# Altium integrated library OmniCore_SDR.IntLib: 98 symbols (part 1 of 2)
Pins are listed as number, name and electrical type; pins without a type are passive.

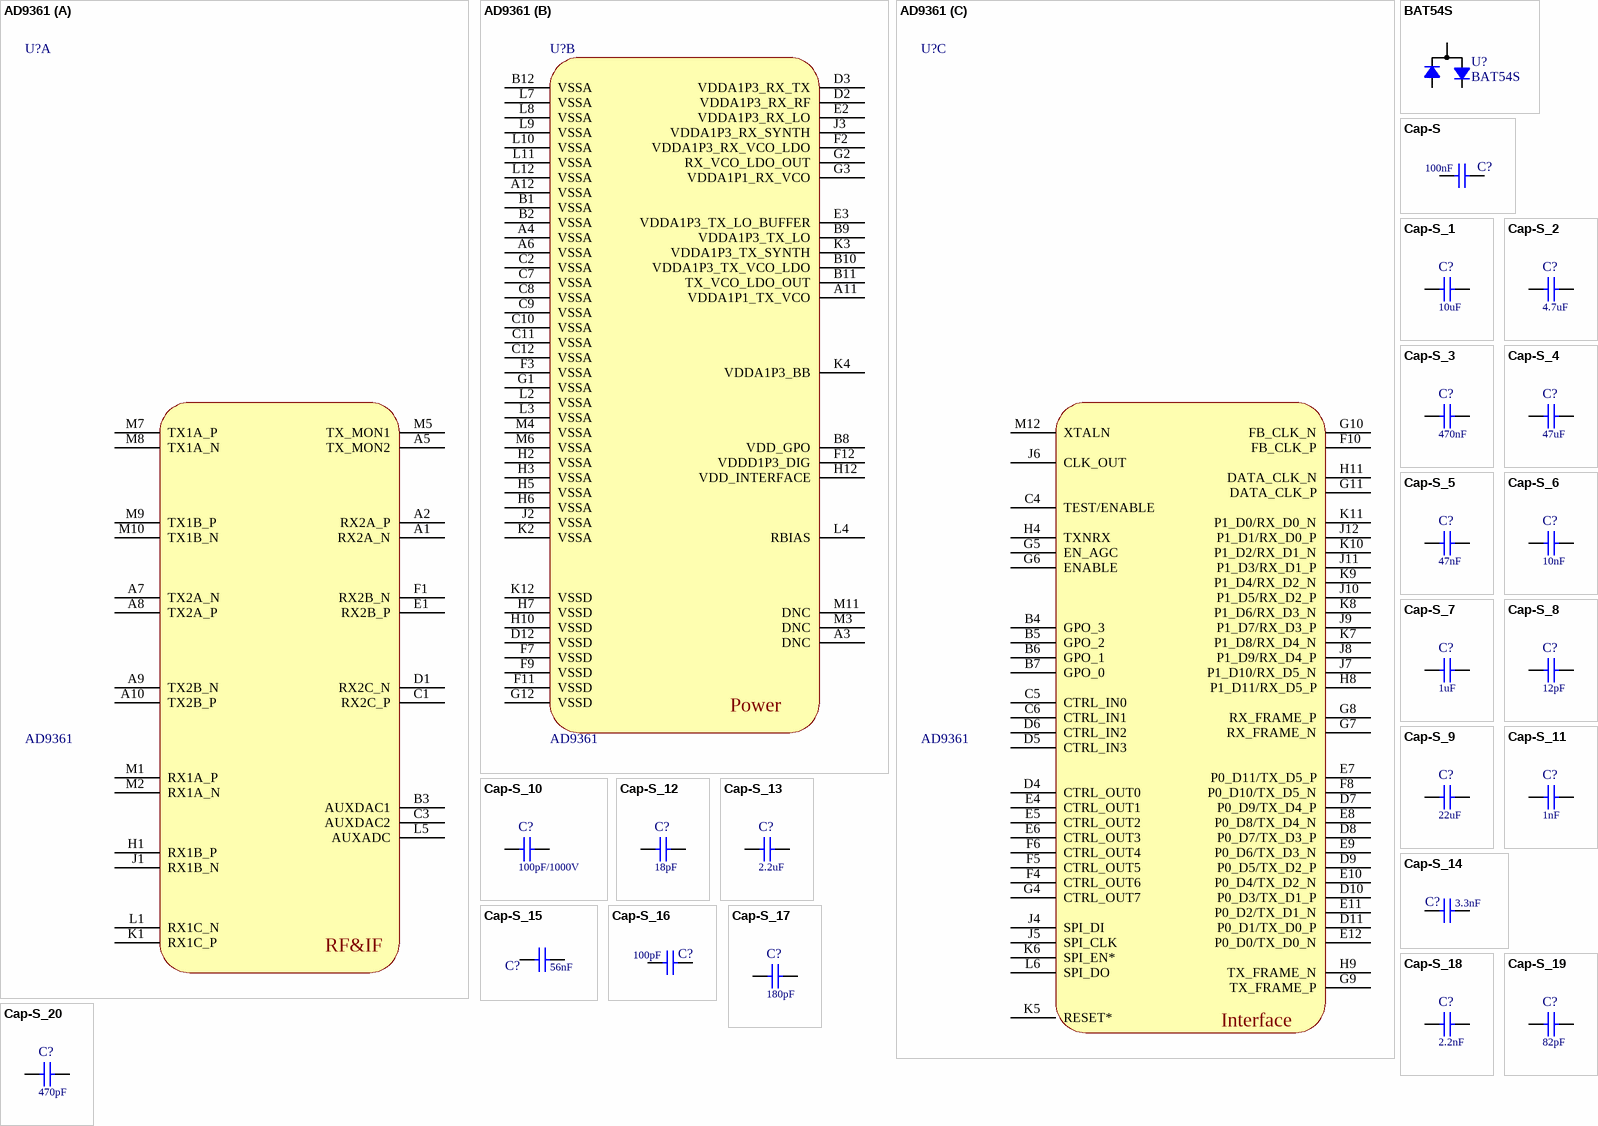
[diagram p0: symbols AD9361 to Cap-S_20]

## AD9361
designator U?
70M-6G射频收发器
footprint BGA144C80P12X12_1000X1000X170
part A pins: A1 RX2A_N, A2 RX2A_P, A5 TX_MON2, A7 TX2A_N, A8 TX2A_P, A9 TX2B_N, A10 TX2B_P, B3 AUXDAC1, C1 RX2C_P, C3 AUXDAC2, D1 RX2C_N, E1 RX2B_P, F1 RX2B_N, H1 RX1B_P, J1 RX1B_N, K1 RX1C_P, L1 RX1C_N, L5 AUXADC, M1 RX1A_P, M2 RX1A_N, M5 TX_MON1, M7 TX1A_P, M8 TX1A_N, M9 TX1B_P, M10 TX1B_N
part B pins: A3 DNC, A4 VSSA, A6 VSSA, A11 VDDA1P1_TX_VCO, A12 VSSA, B1 VSSA, B2 VSSA, B8 VDD_GPO, B9 VDDA1P3_TX_LO, B10 VDDA1P3_TX_VCO_LDO, B11 TX_VCO_LDO_OUT, B12 VSSA, C2 VSSA, C7 VSSA, C8 VSSA, C9 VSSA, C10 VSSA, C11 VSSA, C12 VSSA, D2 VDDA1P3_RX_RF, D3 VDDA1P3_RX_TX, D12 VSSD, E2 VDDA1P3_RX_LO, E3 VDDA1P3_TX_LO_BUFFER, F2 VDDA1P3_RX_VCO_LDO, F3 VSSA, F7 VSSD, F9 VSSD, F11 VSSD, F12 VDDD1P3_DIG, G1 VSSA, G2 RX_VCO_LDO_OUT, G3 VDDA1P1_RX_VCO, G12 VSSD, H2 VSSA, H3 VSSA, H5 VSSA, H6 VSSA, H7 VSSD, H10 VSSD, H12 VDD_INTERFACE, J2 VSSA, J3 VDDA1P3_RX_SYNTH, K2 VSSA, K3 VDDA1P3_TX_SYNTH, K4 VDDA1P3_BB, K12 VSSD, L2 VSSA, L3 VSSA, L4 RBIAS, L7 VSSA, L8 VSSA, L9 VSSA, L10 VSSA, L11 VSSA, L12 VSSA, M3 DNC, M4 VSSA, M6 VSSA, M11 DNC
part C pins: B4 GPO_3, B5 GPO_2, B6 GPO_1, B7 GPO_0, C4 TEST/ENABLE, C5 CTRL_IN0, C6 CTRL_IN1, D4 CTRL_OUT0, D5 CTRL_IN3, D6 CTRL_IN2, D7 P0_D9/TX_D4_P, D8 P0_D7/TX_D3_P, D9 P0_D5/TX_D2_P, D10 P0_D3/TX_D1_P, D11 P0_D1/TX_D0_P, E4 CTRL_OUT1, E5 CTRL_OUT2, E6 CTRL_OUT3, E7 P0_D11/TX_D5_P, E8 P0_D8/TX_D4_N, E9 P0_D6/TX_D3_N, E10 P0_D4/TX_D2_N, E11 P0_D2/TX_D1_N, E12 P0_D0/TX_D0_N, F4 CTRL_OUT6, F5 CTRL_OUT5, F6 CTRL_OUT4, F8 P0_D10/TX_D5_N, F10 FB_CLK_P, G4 CTRL_OUT7, G5 EN_AGC, G6 ENABLE, G7 RX_FRAME_N, G8 RX_FRAME_P, G9 TX_FRAME_P, G10 FB_CLK_N, G11 DATA_CLK_P, H4 TXNRX, H8 P1_D11/RX_D5_P, H9 TX_FRAME_N, H11 DATA_CLK_N, J4 SPI_DI, J5 SPI_CLK, J6 CLK_OUT, J7 P1_D10/RX_D5_N, J8 P1_D9/RX_D4_P, J9 P1_D7/RX_D3_P, J10 P1_D5/RX_D2_P, J11 P1_D3/RX_D1_P, J12 P1_D1/RX_D0_P, K5 RESET*, K6 SPI_EN*, K7 P1_D8/RX_D4_N, K8 P1_D6/RX_D3_N, K9 P1_D4/RX_D2_N, K10 P1_D2/RX_D1_N, K11 P1_D0/RX_D0_N, L6 SPI_DO, M12 XTALN
part A text: RF&IF
part B text: Power
part C text: Interface

## BAT54S
designator U?
footprint SOT-23-3
pins: 1, 2, 3

## Cap-S
designator C?  value 100nF  (hidden comment: Cap-S)
贴片瓷片电容
footprint C0603-L (贴片电容0603 高密度)
footprint C0402-M (Chip Capacitor 0402(1005)  低密度)
footprint C0402-L (Chip Capacitor, Body 1.0x0.5mm, 高密度)
footprint C0603-M (Capacitor SMD 0603 (1608)  低密度)
footprint C0805-L (贴片电容0805-高密度)
footprint C0805-M (贴片电容0805-低密度)
footprint C1206-L (Capacitor 1206 (3216) for Startronics  高密度)
footprint C1206-M (贴片电容1206  低密度)
footprint C1210-L (1210 Capacitor SMD - Startronics  高密度)
footprint C1210-M (贴片电容1210  低密度)
footprint C1812 (贴片电容)
footprint C2010 (贴片电容)
footprint C2512 (贴片电容)
pins: 1, 2

## Cap-S_1
designator C?, comment value 10uF  (hidden comment: Cap-S)
贴片瓷片电容
footprint C0603-L (贴片电容0603 高密度)
footprint C0402-M (Chip Capacitor 0402(1005)  低密度)
footprint C0402-L (Chip Capacitor, Body 1.0x0.5mm, 高密度)
footprint C0603-M (Capacitor SMD 0603 (1608)  低密度)
footprint C0805-L (贴片电容0805-高密度)
footprint C0805-M (贴片电容0805-低密度)
footprint C1206-L (Capacitor 1206 (3216) for Startronics  高密度)
footprint C1206-M (贴片电容1206  低密度)
footprint C1210-L (1210 Capacitor SMD - Startronics  高密度)
footprint C1210-M (贴片电容1210  低密度)
footprint C1812 (贴片电容)
footprint C2010 (贴片电容)
footprint C2512 (贴片电容)
footprint C0402-S (C0402)
pins: 1, 2

## Cap-S_2
designator C?, comment value 4.7uF  (hidden comment: Cap-S)
贴片瓷片电容
footprint C0603-L (贴片电容0603 高密度)
footprint C0402-M (Chip Capacitor 0402(1005)  低密度)
footprint C0402-L (Chip Capacitor, Body 1.0x0.5mm, 高密度)
footprint C0603-M (Capacitor SMD 0603 (1608)  低密度)
footprint C0805-L (贴片电容0805-高密度)
footprint C0805-M (贴片电容0805-低密度)
footprint C1206-L (Capacitor 1206 (3216) for Startronics  高密度)
footprint C1206-M (贴片电容1206  低密度)
footprint C1210-L (1210 Capacitor SMD - Startronics  高密度)
footprint C1210-M (贴片电容1210  低密度)
footprint C1812 (贴片电容)
footprint C2010 (贴片电容)
footprint C2512 (贴片电容)
footprint C0402-S (C0402)
pins: 1, 2

## Cap-S_3
designator C?, comment value 470nF  (hidden comment: Cap-S)
贴片瓷片电容
footprint C0603-L (贴片电容0603 高密度)
footprint C0402-M (Chip Capacitor 0402(1005)  低密度)
footprint C0402-L (Chip Capacitor, Body 1.0x0.5mm, 高密度)
footprint C0603-M (Capacitor SMD 0603 (1608)  低密度)
footprint C0805-L (贴片电容0805-高密度)
footprint C0805-M (贴片电容0805-低密度)
footprint C1206-L (Capacitor 1206 (3216) for Startronics  高密度)
footprint C1206-M (贴片电容1206  低密度)
footprint C1210-L (1210 Capacitor SMD - Startronics  高密度)
footprint C1210-M (贴片电容1210  低密度)
footprint C1812 (贴片电容)
footprint C2010 (贴片电容)
footprint C2512 (贴片电容)
footprint C0402-S (C0402)
pins: 1, 2

## Cap-S_4
designator C?, comment value 47uF  (hidden comment: Cap-S)
贴片瓷片电容
footprint C0603-L (贴片电容0603 高密度)
footprint C0402-M (Chip Capacitor 0402(1005)  低密度)
footprint C0402-L (Chip Capacitor, Body 1.0x0.5mm, 高密度)
footprint C0603-M (Capacitor SMD 0603 (1608)  低密度)
footprint C0805-L (贴片电容0805-高密度)
footprint C0805-M (贴片电容0805-低密度)
footprint C1206-L (Capacitor 1206 (3216) for Startronics  高密度)
footprint C1206-M (贴片电容1206  低密度)
footprint C1210-L (1210 Capacitor SMD - Startronics  高密度)
footprint C1210-M (贴片电容1210  低密度)
footprint C1812 (贴片电容)
footprint C2010 (贴片电容)
footprint C2512 (贴片电容)
footprint C0402-S (C0402)
pins: 1, 2

## Cap-S_5
designator C?, comment value 47nF  (hidden comment: Cap-S)
贴片瓷片电容
footprint C0603-L (贴片电容0603 高密度)
footprint C0402-M (Chip Capacitor 0402(1005)  低密度)
footprint C0402-L (Chip Capacitor, Body 1.0x0.5mm, 高密度)
footprint C0603-M (Capacitor SMD 0603 (1608)  低密度)
footprint C0805-L (贴片电容0805-高密度)
footprint C0805-M (贴片电容0805-低密度)
footprint C1206-L (Capacitor 1206 (3216) for Startronics  高密度)
footprint C1206-M (贴片电容1206  低密度)
footprint C1210-L (1210 Capacitor SMD - Startronics  高密度)
footprint C1210-M (贴片电容1210  低密度)
footprint C1812 (贴片电容)
footprint C2010 (贴片电容)
footprint C2512 (贴片电容)
pins: 1, 2

## Cap-S_6
designator C?, comment value 10nF  (hidden comment: Cap-S)
贴片瓷片电容
footprint C0603-L (贴片电容0603 高密度)
footprint C0402-M (Chip Capacitor 0402(1005)  低密度)
footprint C0402-L (Chip Capacitor, Body 1.0x0.5mm, 高密度)
footprint C0603-M (Capacitor SMD 0603 (1608)  低密度)
footprint C0805-L (贴片电容0805-高密度)
footprint C0805-M (贴片电容0805-低密度)
footprint C1206-L (Capacitor 1206 (3216) for Startronics  高密度)
footprint C1206-M (贴片电容1206  低密度)
footprint C1210-L (1210 Capacitor SMD - Startronics  高密度)
footprint C1210-M (贴片电容1210  低密度)
footprint C1812 (贴片电容)
footprint C2010 (贴片电容)
footprint C2512 (贴片电容)
pins: 1, 2

## Cap-S_7
designator C?, comment value 1uF  (hidden comment: Cap-S)
贴片瓷片电容
footprint C0603-L (贴片电容0603 高密度)
footprint C0402-M (Chip Capacitor 0402(1005)  低密度)
footprint C0402-L (Chip Capacitor, Body 1.0x0.5mm, 高密度)
footprint C0603-M (Capacitor SMD 0603 (1608)  低密度)
footprint C0805-L (贴片电容0805-高密度)
footprint C0805-M (贴片电容0805-低密度)
footprint C1206-L (Capacitor 1206 (3216) for Startronics  高密度)
footprint C1206-M (贴片电容1206  低密度)
footprint C1210-L (1210 Capacitor SMD - Startronics  高密度)
footprint C1210-M (贴片电容1210  低密度)
footprint C1812 (贴片电容)
footprint C2010 (贴片电容)
footprint C2512 (贴片电容)
pins: 1, 2

## Cap-S_8
designator C?, comment value 12pF  (hidden comment: Cap-S)
贴片瓷片电容
footprint C0603-L (贴片电容0603 高密度)
footprint C0402-M (Chip Capacitor 0402(1005)  低密度)
footprint C0402-L (Chip Capacitor, Body 1.0x0.5mm, 高密度)
footprint C0603-M (Capacitor SMD 0603 (1608)  低密度)
footprint C0805-L (贴片电容0805-高密度)
footprint C0805-M (贴片电容0805-低密度)
footprint C1206-L (Capacitor 1206 (3216) for Startronics  高密度)
footprint C1206-M (贴片电容1206  低密度)
footprint C1210-L (1210 Capacitor SMD - Startronics  高密度)
footprint C1210-M (贴片电容1210  低密度)
footprint C1812 (贴片电容)
footprint C2010 (贴片电容)
footprint C2512 (贴片电容)
pins: 1, 2

## Cap-S_9
designator C?, comment value 22uF  (hidden comment: Cap-S)
贴片瓷片电容
footprint C0603-L (贴片电容0603 高密度)
footprint C0402-M (Chip Capacitor 0402(1005)  低密度)
footprint C0402-L (Chip Capacitor, Body 1.0x0.5mm, 高密度)
footprint C0603-M (Capacitor SMD 0603 (1608)  低密度)
footprint C0805-L (贴片电容0805-高密度)
footprint C0805-M (贴片电容0805-低密度)
footprint C1206-L (Capacitor 1206 (3216) for Startronics  高密度)
footprint C1206-M (贴片电容1206  低密度)
footprint C1210-L (1210 Capacitor SMD - Startronics  高密度)
footprint C1210-M (贴片电容1210  低密度)
footprint C1812 (贴片电容)
footprint C2010 (贴片电容)
footprint C2512 (贴片电容)
pins: 1, 2

## Cap-S_10
designator C?, comment value 100pF/1000V  (hidden comment: Cap-S)
贴片瓷片电容
footprint C0603-L (贴片电容0603 高密度)
footprint C0402-M (Chip Capacitor 0402(1005)  低密度)
footprint C0402-L (Chip Capacitor, Body 1.0x0.5mm, 高密度)
footprint C0603-M (Capacitor SMD 0603 (1608)  低密度)
footprint C0805-L (贴片电容0805-高密度)
footprint C0805-M (贴片电容0805-低密度)
footprint C1206-L (Capacitor 1206 (3216) for Startronics  高密度)
footprint C1206-M (贴片电容1206  低密度)
footprint C1210-L (1210 Capacitor SMD - Startronics  高密度)
footprint C1210-M (贴片电容1210  低密度)
footprint C1812 (贴片电容)
footprint C2010 (贴片电容)
footprint C2512 (贴片电容)
pins: 1, 2

## Cap-S_11
designator C?, comment value 1nF  (hidden comment: Cap-S)
贴片瓷片电容
footprint C0603-L (贴片电容0603 高密度)
footprint C0402-M (Chip Capacitor 0402(1005)  低密度)
footprint C0402-L (Chip Capacitor, Body 1.0x0.5mm, 高密度)
footprint C0603-M (Capacitor SMD 0603 (1608)  低密度)
footprint C0805-L (贴片电容0805-高密度)
footprint C0805-M (贴片电容0805-低密度)
footprint C1206-L (Capacitor 1206 (3216) for Startronics  高密度)
footprint C1206-M (贴片电容1206  低密度)
footprint C1210-L (1210 Capacitor SMD - Startronics  高密度)
footprint C1210-M (贴片电容1210  低密度)
footprint C1812 (贴片电容)
footprint C2010 (贴片电容)
footprint C2512 (贴片电容)
pins: 1, 2

## Cap-S_12
designator C?, comment value 18pF  (hidden comment: Cap-S)
贴片瓷片电容
footprint C0603-L (贴片电容0603 高密度)
footprint C0402-M (Chip Capacitor 0402(1005)  低密度)
footprint C0402-L (Chip Capacitor, Body 1.0x0.5mm, 高密度)
footprint C0603-M (Capacitor SMD 0603 (1608)  低密度)
footprint C0805-L (贴片电容0805-高密度)
footprint C0805-M (贴片电容0805-低密度)
footprint C1206-L (Capacitor 1206 (3216) for Startronics  高密度)
footprint C1206-M (贴片电容1206  低密度)
footprint C1210-L (1210 Capacitor SMD - Startronics  高密度)
footprint C1210-M (贴片电容1210  低密度)
footprint C1812 (贴片电容)
footprint C2010 (贴片电容)
footprint C2512 (贴片电容)
pins: 1, 2

## Cap-S_13
designator C?, comment value 2.2uF  (hidden comment: Cap-S)
贴片瓷片电容
footprint C0603-L (贴片电容0603 高密度)
footprint C0402-M (Chip Capacitor 0402(1005)  低密度)
footprint C0402-L (Chip Capacitor, Body 1.0x0.5mm, 高密度)
footprint C0603-M (Capacitor SMD 0603 (1608)  低密度)
footprint C0805-L (贴片电容0805-高密度)
footprint C0805-M (贴片电容0805-低密度)
footprint C1206-L (Capacitor 1206 (3216) for Startronics  高密度)
footprint C1206-M (贴片电容1206  低密度)
footprint C1210-L (1210 Capacitor SMD - Startronics  高密度)
footprint C1210-M (贴片电容1210  低密度)
footprint C1812 (贴片电容)
footprint C2010 (贴片电容)
footprint C2512 (贴片电容)
pins: 1, 2

## Cap-S_14
designator C?, comment value 3.3nF  (hidden comment: Cap-S)
贴片瓷片电容
footprint C0603-L (贴片电容0603 高密度)
footprint C0402-M (Chip Capacitor 0402(1005)  低密度)
footprint C0402-L (Chip Capacitor, Body 1.0x0.5mm, 高密度)
footprint C0603-M (Capacitor SMD 0603 (1608)  低密度)
footprint C0805-L (贴片电容0805-高密度)
footprint C0805-M (贴片电容0805-低密度)
footprint C1206-L (Capacitor 1206 (3216) for Startronics  高密度)
footprint C1206-M (贴片电容1206  低密度)
footprint C1210-L (1210 Capacitor SMD - Startronics  高密度)
footprint C1210-M (贴片电容1210  低密度)
footprint C1812 (贴片电容)
footprint C2010 (贴片电容)
footprint C2512 (贴片电容)
pins: 1, 2

## Cap-S_15
designator C?, comment value 56nF  (hidden comment: Cap-S)
贴片瓷片电容
footprint C0603-L (贴片电容0603 高密度)
footprint C0402-M (Chip Capacitor 0402(1005)  低密度)
footprint C0402-L (Chip Capacitor, Body 1.0x0.5mm, 高密度)
footprint C0603-M (Capacitor SMD 0603 (1608)  低密度)
footprint C0805-L (贴片电容0805-高密度)
footprint C0805-M (贴片电容0805-低密度)
footprint C1206-L (Capacitor 1206 (3216) for Startronics  高密度)
footprint C1206-M (贴片电容1206  低密度)
footprint C1210-L (1210 Capacitor SMD - Startronics  高密度)
footprint C1210-M (贴片电容1210  低密度)
footprint C1812 (贴片电容)
footprint C2010 (贴片电容)
footprint C2512 (贴片电容)
pins: 1, 2

## Cap-S_16
designator C?, comment value 100pF  (hidden comment: Cap-S)
贴片瓷片电容
footprint C0603-L (贴片电容0603 高密度)
footprint C0402-M (Chip Capacitor 0402(1005)  低密度)
footprint C0402-L (Chip Capacitor, Body 1.0x0.5mm, 高密度)
footprint C0603-M (Capacitor SMD 0603 (1608)  低密度)
footprint C0805-L (贴片电容0805-高密度)
footprint C0805-M (贴片电容0805-低密度)
footprint C1206-L (Capacitor 1206 (3216) for Startronics  高密度)
footprint C1206-M (贴片电容1206  低密度)
footprint C1210-L (1210 Capacitor SMD - Startronics  高密度)
footprint C1210-M (贴片电容1210  低密度)
footprint C1812 (贴片电容)
footprint C2010 (贴片电容)
footprint C2512 (贴片电容)
footprint C0402-S (C0402)
pins: 1, 2

## Cap-S_17
designator C?, comment value 180pF  (hidden comment: Cap-S)
贴片瓷片电容
footprint C0603-L (贴片电容0603 高密度)
footprint C0402-M (Chip Capacitor 0402(1005)  低密度)
footprint C0402-L (Chip Capacitor, Body 1.0x0.5mm, 高密度)
footprint C0603-M (Capacitor SMD 0603 (1608)  低密度)
footprint C0805-L (贴片电容0805-高密度)
footprint C0805-M (贴片电容0805-低密度)
footprint C1206-L (Capacitor 1206 (3216) for Startronics  高密度)
footprint C1206-M (贴片电容1206  低密度)
footprint C1210-L (1210 Capacitor SMD - Startronics  高密度)
footprint C1210-M (贴片电容1210  低密度)
footprint C1812 (贴片电容)
footprint C2010 (贴片电容)
footprint C2512 (贴片电容)
footprint C0402-S (C0402)
pins: 1, 2

## Cap-S_18
designator C?, comment value 2.2nF  (hidden comment: Cap-S)
贴片瓷片电容
footprint C0603-L (贴片电容0603 高密度)
footprint C0402-M (Chip Capacitor 0402(1005)  低密度)
footprint C0402-L (Chip Capacitor, Body 1.0x0.5mm, 高密度)
footprint C0603-M (Capacitor SMD 0603 (1608)  低密度)
footprint C0805-L (贴片电容0805-高密度)
footprint C0805-M (贴片电容0805-低密度)
footprint C1206-L (Capacitor 1206 (3216) for Startronics  高密度)
footprint C1206-M (贴片电容1206  低密度)
footprint C1210-L (1210 Capacitor SMD - Startronics  高密度)
footprint C1210-M (贴片电容1210  低密度)
footprint C1812 (贴片电容)
footprint C2010 (贴片电容)
footprint C2512 (贴片电容)
footprint C0402-S (C0402)
pins: 1, 2

## Cap-S_19
designator C?, comment value 82pF  (hidden comment: Cap-S)
贴片瓷片电容
footprint C0603-L (贴片电容0603 高密度)
footprint C0402-M (Chip Capacitor 0402(1005)  低密度)
footprint C0402-L (Chip Capacitor, Body 1.0x0.5mm, 高密度)
footprint C0603-M (Capacitor SMD 0603 (1608)  低密度)
footprint C0805-L (贴片电容0805-高密度)
footprint C0805-M (贴片电容0805-低密度)
footprint C1206-L (Capacitor 1206 (3216) for Startronics  高密度)
footprint C1206-M (贴片电容1206  低密度)
footprint C1210-L (1210 Capacitor SMD - Startronics  高密度)
footprint C1210-M (贴片电容1210  低密度)
footprint C1812 (贴片电容)
footprint C2010 (贴片电容)
footprint C2512 (贴片电容)
footprint C0402-S (C0402)
pins: 1, 2

## Cap-S_20
designator C?, comment value 470pF  (hidden comment: Cap-S)
贴片瓷片电容
footprint C0603-L (贴片电容0603 高密度)
footprint C0402-M (Chip Capacitor 0402(1005)  低密度)
footprint C0402-L (Chip Capacitor, Body 1.0x0.5mm, 高密度)
footprint C0603-M (Capacitor SMD 0603 (1608)  低密度)
footprint C0805-L (贴片电容0805-高密度)
footprint C0805-M (贴片电容0805-低密度)
footprint C1206-L (Capacitor 1206 (3216) for Startronics  高密度)
footprint C1206-M (贴片电容1206  低密度)
footprint C1210-L (1210 Capacitor SMD - Startronics  高密度)
footprint C1210-M (贴片电容1210  低密度)
footprint C1812 (贴片电容)
footprint C2010 (贴片电容)
footprint C2512 (贴片电容)
footprint C0402-S (C0402)
pins: 1, 2

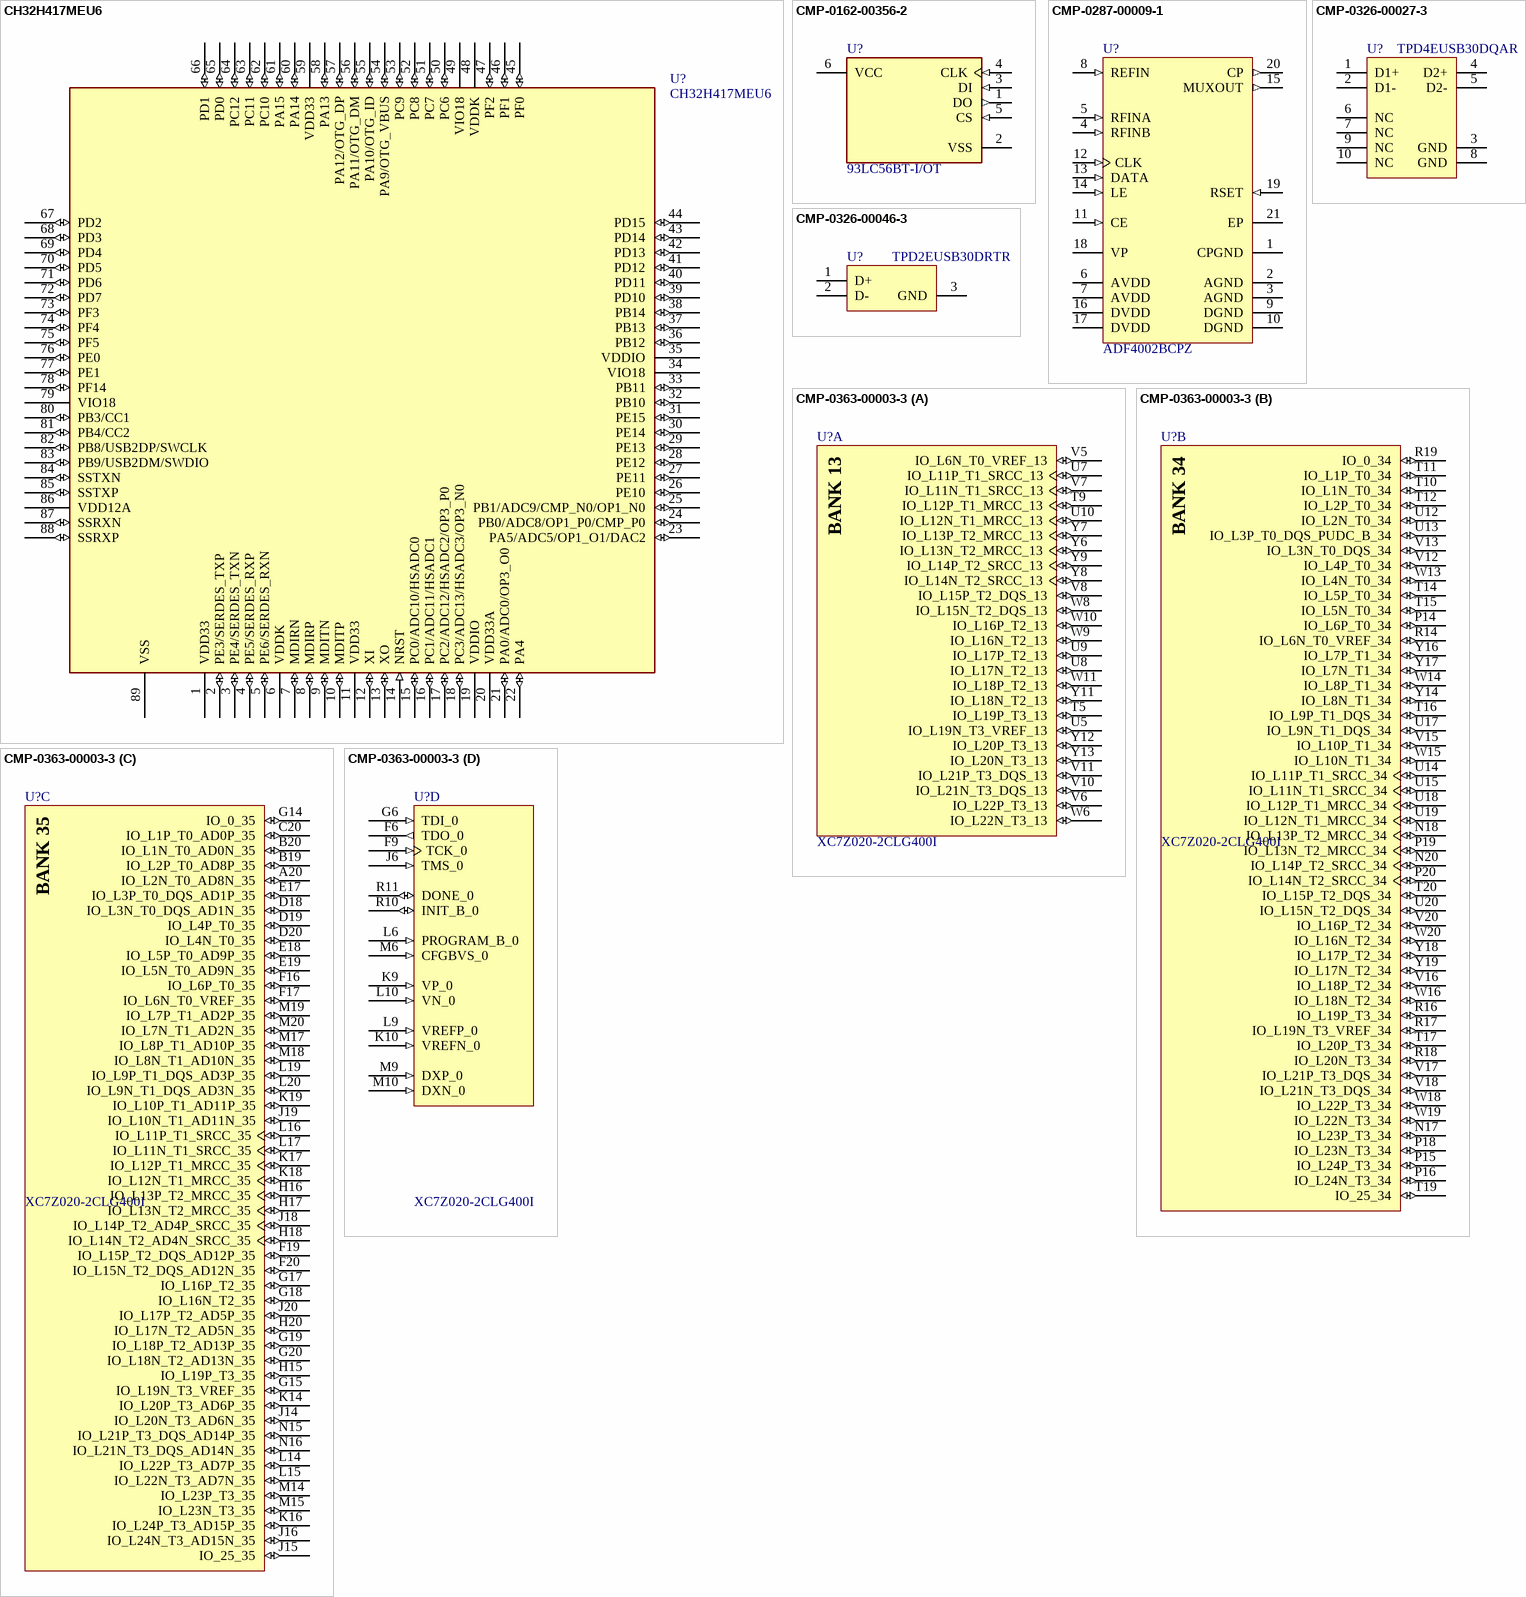
[diagram p1: symbols CH32H417MEU6 to CMP-0363-00003-3]

## CH32H417MEU6
designator U?
RISC-V FPU HD-MCU, 384MHz, USB3.0 & PD, 100M Ethernet, DVP, QSPI, OPA, ADC, DAC
footprint QFN-88_L10.0-W10.0-P0.40-BL-EP7.7
pins: 1 VDD33 (power), 2 PE3/SERDES_TXP (io), 3 PE4/SERDES_TXN (io), 4 PE5/SERDES_RXP (io), 5 PE6/SERDES_RXN (io), 6 VDDK (power), 7 MDIRN (io), 8 MDIRP (io), 9 MDITN (io), 10 MDITP (io), 11 VDD33 (power), 12 XI (io), 13 XO (io), 14 NRST (in), 15 PC0/ADC10/HSADC0 (io), 16 PC1/ADC11/HSADC1 (io), 17 PC2/ADC12/HSADC2/OP3_P0 (io), 18 PC3/ADC13/HSADC3/OP3_N0 (io), 19 VDDIO (power), 20 VDD33A (power), 21 PA0/ADC0/OP3_O0 (io), 22 PA4 (io), 23 PA5/ADC5/OP1_O1/DAC2 (io), 24 PB0/ADC8/OP1_P0/CMP_P0 (io), 25 PB1/ADC9/CMP_N0/OP1_N0 (io), 26 PE10 (io), 27 PE11 (io), 28 PE12 (io), 29 PE13 (io), 30 PE14 (io), 31 PE15 (io), 32 PB10 (io), 33 PB11 (io), 34 VIO18 (power), 35 VDDIO (power), 36 PB12 (io), 37 PB13 (io), 38 PB14 (io), 39 PD10 (io), 40 PD11 (io), 41 PD12 (io), 42 PD13 (io), 43 PD14 (io), 44 PD15 (io), 45 PF0 (io), 46 PF1 (io), 47 PF2 (io), 48 VDDK (power), 49 VIO18 (power), 50 PC6 (io), 51 PC7 (io), 52 PC8 (io), 53 PC9 (io), 54 PA9/OTG_VBUS (io), 55 PA10/OTG_ID (io), 56 PA11/OTG_DM (io), 57 PA12/OTG_DP (io), 58 PA13 (io), 59 VDD33 (power), 60 PA14 (io), 61 PA15 (io), 62 PC10 (io), 63 PC11 (io), 64 PC12 (io), 65 PD0 (io), 66 PD1 (io), 67 PD2 (io), 68 PD3 (io), 69 PD4 (io), 70 PD5 (io), 71 PD6 (io), 72 PD7 (io), 73 PF3 (io), 74 PF4 (io), 75 PF5 (io), 76 PE0 (io), 77 PE1 (io), 78 PF14 (io), 79 VIO18 (power), 80 PB3/CC1 (io), 81 PB4/CC2 (io), 82 PB8/USB2DP/SWCLK (io), 83 PB9/USB2DM/SWDIO (io), 84 SSTXN (io), 85 SSTXP (io), 86 VDD12A (power), 87 SSRXN (io), 88 SSRXP (io), 89 VSS (power)

## CMP-0162-00356-2
designator U?, comment 93LC56BT-I/OT
IC EEPROM 2K SPI 2MHZ SOT23-6; Manufacturer: Microchip; Access Time: 250ns; Density: 2Kb; Max Supply Voltage: 5.5V; Interface: Serial; Min Supply Voltage: 2.5V; Nominal Supply Current: 2mA; Number of Pins: 6; Radiation Hardening: No; Length: 3.1mm; Height: 1.3mm; Min Operating Temperature: -40°C; Max Operating Temperature: 85°C; Lead Free: Lead Free; Memory Type: EEPROM; Contact Plating: Tin; REACH SVHC: No SVHC; Package Quantity: 3000; Frequency: 2MHz; Width: 1.8mm; Max Frequency: 2MHz; Case/Package: SOT-23; Mount: Surface Mount; Packaging: Tape and Reel; Memory Size: 2Kb; Manufacturer Part Number: 93LC56BT-I/OT
footprint FP-C04-028-MFG
footprint FP-C04-028-IPC_C
footprint FP-C04-028-IPC_A
footprint FP-C04-028-IPC_B
pins: 1 DO (out), 2 VSS (power), 3 DI (in), 4 CLK (in), 5 CS (in), 6 VCC (power)

## CMP-0287-00009-1
designator U?, comment ADF4002BCPZ
200 MHz Clock Generator PLL, CP-20-1, Pb-Free, 490 Tray; Manufacturer: Analog Devices; Manufacturer Part Number: ADF4001BCPZ; Norm Phase Noise (dBc/Hz): -217dBc; Single/Dual: Single; Max REFin (MHz): 104MHz; Max RF Input (MHz): 200MHz; Frequency Range: 10MHz-200MHz; Supply Current: 4.5mA; ComponentLink2Description: Datasheet; PackageDescription: 20-Lead Lead Frame Chip Scale Package [LFCSP_VQ]; ComponentLink3Description: Package Specification; ComponentLink3URL: http://www.analog.com/static/imported-files/packages/PKG_PDF/LFCSP(CP)/CP_20_1.pdf; DatasheetVersion: REV. A; Code_JEDEC: MO-220-VGGD-1; PackageVersion: 012508-B; ComponentLink1Description: Manufacturer URL; ComponentLink1URL: www.analog.com; PackageReference: CP-20-1; ComponentLink2URL: http://www.analog.com/static/imported-files/data_sheets/ADF4001.pdf
footprint ADI-CP-20-1_M (QFN, 20-Leads, Body 4x4mm, Pitch 0.5mm, Thermal Pad 2.2x2.2mm, IPC Low Density)
footprint ADI-CP-20-1_N (QFN, 20-Leads, Body 4x4mm, Pitch 0.5mm, Thermal Pad 2.2x2.2mm, IPC Medium Density)
footprint ADI-CP-20-1_L (QFN, 20-Leads, Body 4x4mm, Pitch 0.5mm, Thermal Pad 2.2x2.2mm, IPC High Density)
pins: 1 CPGND (power) "Charge Pump Ground. This is the ground return path for the charge pump.", 2 AGND (power) "Analog Ground. This is the ground return path of the prescaler.", 3 AGND (power) "Analog Ground. This is the ground return path of the prescaler.", 4 RFINB (in) "Complementary Input to the N counter. This point must be decoupled to the ground plane with a small bypass capacitor, typically 100 pF. See Figure 3.", 5 RFINA (in) "Input to the N counter. This small signal input is ac-coupled to the external VCO or VCXO.", 6 AVDD (power) "Analog Power Supply. This ranges from 2.7 V to 5.5 V. Decoupling capacitors to the analog ground plane should be placed as close as possible to this pin. AVDD must have the", 7 AVDD (power) "Analog Power Supply. This ranges from 2.7 V to 5.5 V. Decoupling capacitors to the analog ground plane should be placed as close as possible to this pin. AVDD must have the", 8 REFIN (in) "Reference Input. This is a CMOS input with a nominal threshold of VDD/2 and a dc equivalent input resistance of 100 k ohm. See Figure 2. [see datasheet]", 9 DGND (power) "Digital Ground.", 10 DGND (power) "Digital Ground.", 11 CE (in) "Chip Enable. A logic low on this pin powers down the device and puts the charge pump output into three-state mode. [see datasheet]", 12 CLK (in) "Serial Clock Input. This serial clock is used to clock in the serial data to the registers. The data is latched into the 24-bit shift register on the CLK rising edge. [see datasheet]", 13 DATA (in) "Serial Data Input. The serial data is loaded MSB first with the two LSBs being the control bits. This input is a high impedance CMOS input.", 14 LE (in) "Load Enable, CMOS Input. When LE goes high, the data stored in the shift registers is loaded into one of the four latches, the latch being selected by using the control bits.", 15 MUXOUT (out) "This multiplexer output allows either the lock detect, the scaled RF, or the scaled reference frequency to be accessed externally.", 16 DVDD (power) "Digital Power Supply. This ranges from 2.7 V to 5.5 V. Decoupling capacitors to the digital ground plane should be placed as close as possible to this pin. [see datasheet]", 17 DVDD (power) "Digital Power Supply. This ranges from 2.7 V to 5.5 V. Decoupling capacitors to the digital ground plane should be placed as close as possible to this pin. [see datasheet]", 18 VP (power) "Charge Pump Power Supply. This should be greater than or equal to VDD. In systems where VDD is 3 V, it can be set to 5 V and used to drive a VCO or VCXO with a tuning range of up to 5 V.", 19 RSET (in) "Connecting a resistor between this pin and CPGND sets the maximum charge pump output current. The nominal voltage potential at the RSET pin is 0.66 V.", 20 CP (out) "Charge Pump Output. When enabled, this provides +/-ICP to the external loop filter which, in turn, drives the external VCO or VCXO.", 21 EP (power) "Exposed pad"

## CMP-0326-00027-3
designator U?, comment TPD4EUSB30DQAR
ESD Solution for Super-Speed (6 GBPS) USB 3.0 Interface, 4 Channels, -40 to +85 degC, 10-pin SON (DQA), Green (RoHS & no Sb/Br); Manufacturer: Texas Instruments; Differential Capacitance(pF): 0.05; Serial ATA / eSATA: TRUE; IO Capacitance(Typ)(pF): 0.8; IO Leakage Current(nA): 10; IEC 61000-4-2 Air-Gap(+/- kV): 8; ComponentLink3Description: URL Link1; PartNumber: TPD4EUSB30DQAR; DatasheetVersion: SLVSAC2C; ComponentLink2URL: http://www.ti.com/general/docs/lit/getliterature.tsp?genericPartNumber=TPD4EUSB30&fileType=pdf; USB Super Speed: TRUE; Eco-Plan: Green (RoHS & no Sb/Br); Mounting Technology: Surface Mount; 1394 / Firewire: TRUE; PackageVersion: revB, Sep-2009; SubFamily: ESD Solution; USB Full Speed: TRUE; USB High Speed: TRUE; ComponentLink2Description: Datasheet; ComponentLink1URL: http://www.ti.com/; IEC 61000-4-2 Contact(+/- kV): 8; Breakdown Voltage(Min)(V): 8; PackageReference: DQA0010A; ComponentLink1Description: Manufacturer URL; PackageDescription: 10-Pin Plastic Small Outline No-Lead, 1 x 2.5 x 0.55 mm Body, 0.5 mm Pitch; ComponentLink3URL: SamplesURL:http://www.ti.com/product/tpd4eusb30#samples; HDMI: TRUE; Manufacturer Part Number: TPD4EUSB30DQAR
footprint DQA0010A_V (SON, 10-Leads, Body 1x2.5mm, Pitch 0.5mm, TI Recommended)
pins: 1 D1+ "High-speed ESD clamp, provides ESD protection to the high-speed differential data line", 2 D1- "High-speed ESD clamp, provides ESD protection to the high-speed differential data line", 3 GND (power) "Ground", 4 D2+ "High-speed ESD clamp, provides ESD protection to the high-speed differential data line", 5 D2- "High-speed ESD clamp, provides ESD protection to the high-speed differential data line", 6 NC "Not normally connected", 7 NC "Not normally connected", 8 GND (power) "Ground", 9 NC "Not normally connected", 10 NC "Not normally connected"

## CMP-0326-00046-3
designator U?, comment TPD2EUSB30DRTR
ESD Solution for Super-Speed (6 Gbps) USB 3.0 Interface, 2 Channels, -40 to +85 degC, 3-pin SOT (DRT), Green (Rohs & No Sb/Br); Manufacturer: Texas Instruments; Differential Capacitance(pF): 0.01; Breakdown Voltage(Min)(V): 9; HDMI: TRUE; IEC 61000-4-2 Air-Gap(+/- kV): 8; IO Leakage Current(nA): 10; IO Capacitance(Typ)(pF): 0.7; Mounting Technology: Surface Mount; PackageDescription: 3-Flat Lead Plastic Small Outline, 1 x 1 mm (inc leads), 0.35 mm Pitch; IEC 61000-4-2 Contact(+/- kV): 8; USB Super Speed: TRUE; Eco-Plan: Green (RoHS & no Sb/Br); USB High Speed: TRUE; PackageReference: DRT0003A; SubFamily: ESD Solution; USB Full Speed: TRUE; ComponentLink1Description: Datasheet; ComponentLink2URL: SamplesURL:http://www.ti.com/product/tpd2eusb30#samples; PackageVersion: revD, Jun-2008; ComponentLink2Description: URL Link1; 1394 / Firewire: TRUE; PartNumber: TPD2EUSB30DRTR; ComponentLink1URL: http://www.ti.com/general/docs/lit/getliterature.tsp?genericPartNumber=TPD2EUSB30&fileType=pdf; DatasheetVersion: SLVSAC2C; Serial ATA / eSATA: TRUE; Manufacturer Part Number: TPD2EUSB30DRTR
footprint DRT0003A (SOTFL, 3-Leads, Body 1x1mm (inc leads), Pitch 0.35mm)
pins: 1 D+ "High-speed ESD clamp, provides ESD protection to the high-speed differential data line.", 2 D- "High-speed ESD clamp, provides ESD protection to the high-speed differential data line.", 3 GND (power) "Ground"

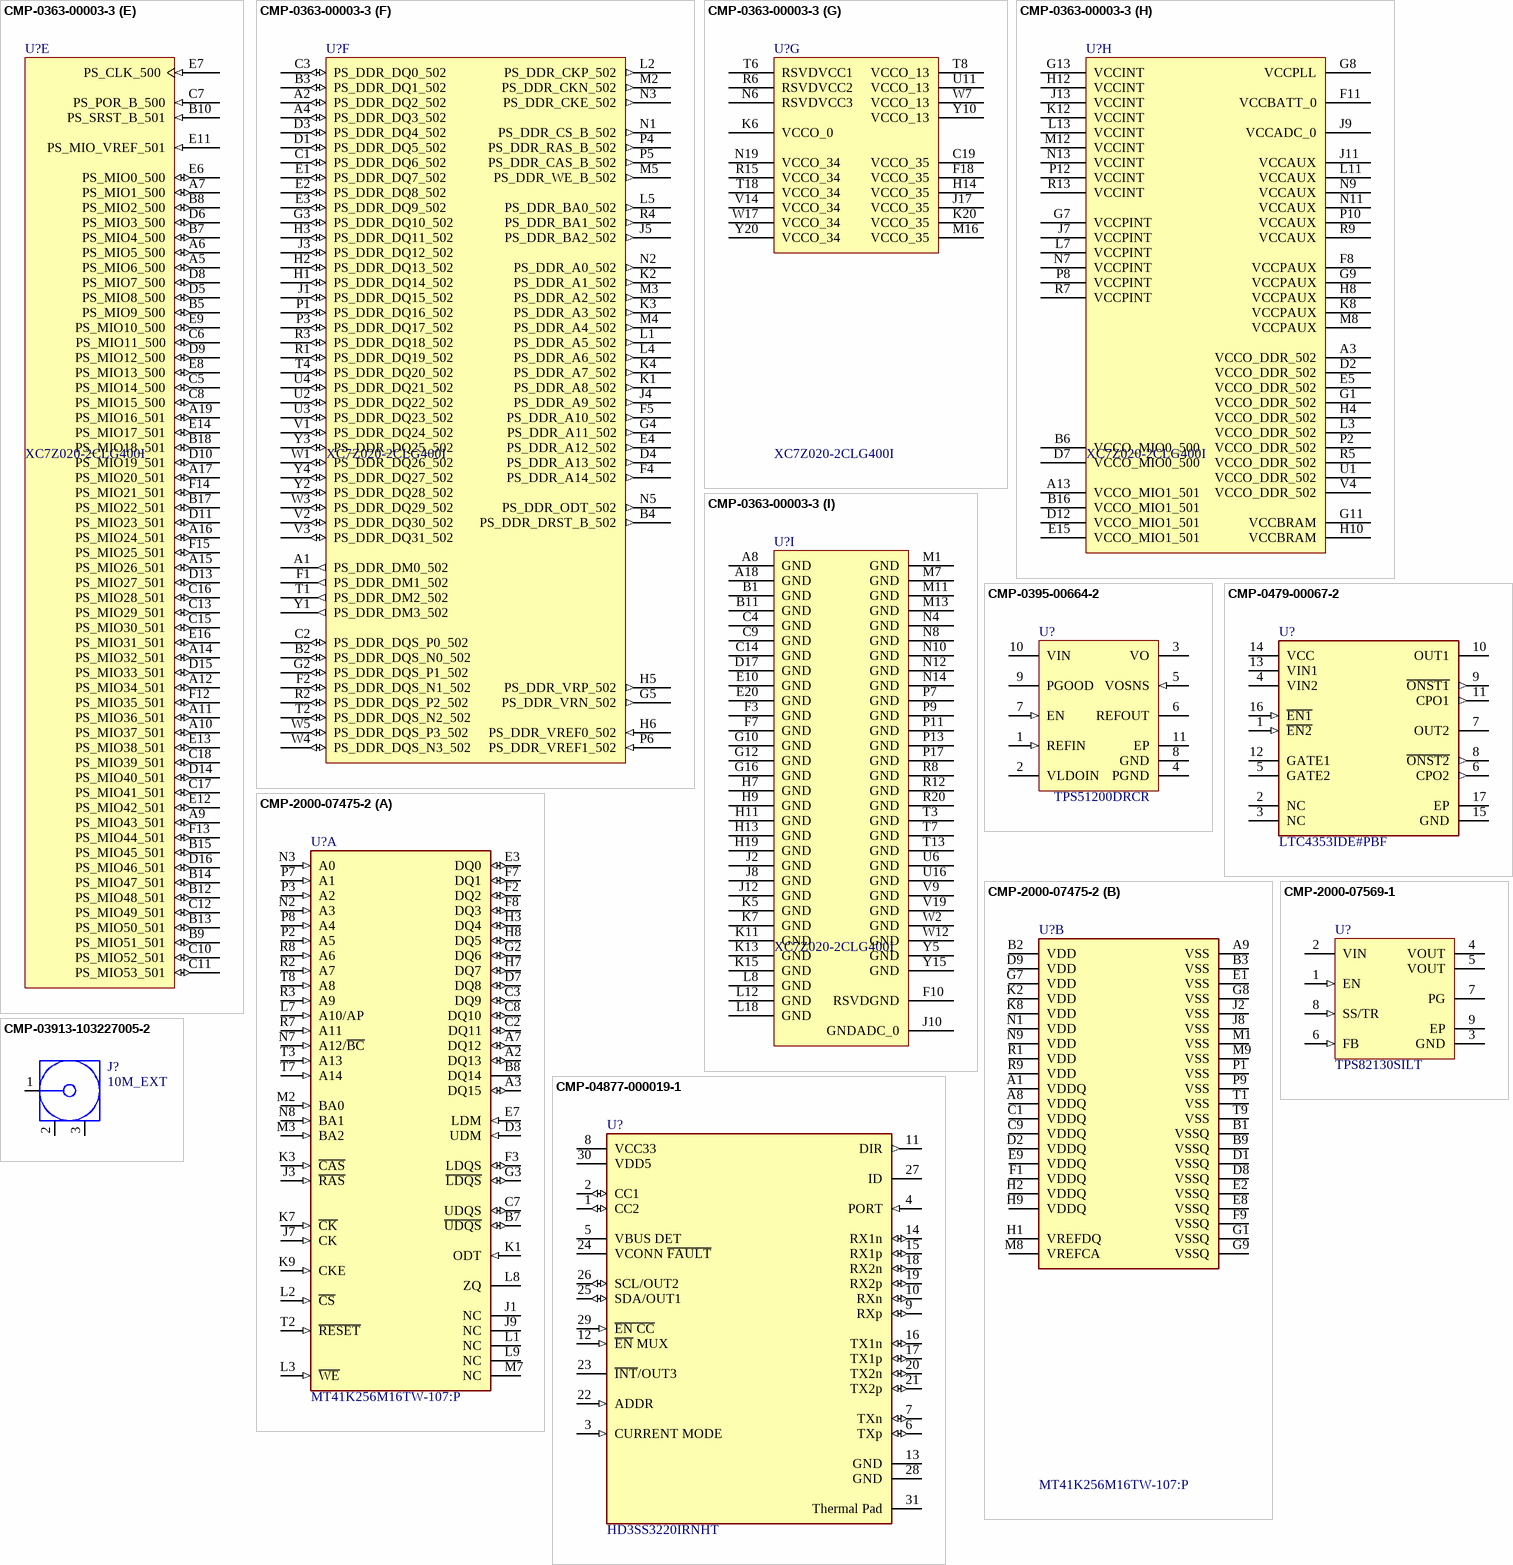
[diagram p2: symbols CMP-0363-00003-3 to CMP-04877-000019-1]

## CMP-0363-00003-3
designator U?, comment XC7Z020-2CLG400I
733 MHz Zynq™-7000 AP SoC, 130 PS I/O, 125 FPGA I/O, 400-Ball BGA, Speed Grade 2, Industrial Grade, Pb-Free; Manufacturer: Xilinx; LUTs: 53200; Flip Flops: 106400; Speed Grade: -2; Extensible Block RAM (# 36Kb Blocks): 560 KB (140); ComponentLink2URL: http://www.xilinx.com/support/documentation/user_guides/ug865-Zynq-7000-Pkg-Pinout.pdf; ComponentLink1Description: Datasheet; PartNumber: XC7Z020-2CLG400I; ComponentLink3URL: http://www.xilinx.com/support/documentation/data_sheets/ds187-XC7Z010-XC7Z020-Data-Sheet.pdf; Mounting Technology: Surface Mount; ComponentLink6Description: PCB and Layout Guide; ComponentLink3Description: DC and AC Switching Characteristics; ComponentLink4Description: Package File; PackageVersion: Rev 1.1, 09/2012; ComponentLink6URL: http://www.xilinx.com/support/documentation/user_guides/ug483_7Series_PCB.pdf; PackageDescription: Wire-Bond Chip-Scale BGA, Body 17 x 17 mm, 0.8 mm Pitch; ComponentLink5Description: Packaging and Pinout; Generic Part Number: XC7Z020; RoHS: Pb-Free; PackageReference: CLG400; ComponentLink1URL: http://www.xilinx.com/support/documentation/data_sheets/ds190-Zynq-7000-Overview.pdf; ComponentLink2Description: Package Specification; ComponentLink5URL: http://www.xilinx.com/support/documentation/user_guides/ug865-Zynq-7000-Pkg-Pinout.pdf; DatasheetVersion: v1.2; ComponentLink4URL: http://www.xilinx.com/support/packagefiles/z7packages/xc7z020clg400pkg.txt; Code_JEDEC: MO-275-MMAA-1
footprint CLG400 (BGA, 400-Balls, Body 17x17mm, Pitch 0.8mm)
part A pins: T5 IO_L19P_T3_13 (io), T9 IO_L12P_T1_MRCC_13 (io), U5 IO_L19N_T3_VREF_13 (io), U7 IO_L11P_T1_SRCC_13 (io), U8 IO_L17N_T2_13 (io), U9 IO_L17P_T2_13 (io), U10 IO_L12N_T1_MRCC_13 (io), V5 IO_L6N_T0_VREF_13 (io), V6 IO_L22P_T3_13 (io), V7 IO_L11N_T1_SRCC_13 (io), V8 IO_L15P_T2_DQS_13 (io), V10 IO_L21N_T3_DQS_13 (io), V11 IO_L21P_T3_DQS_13 (io), W6 IO_L22N_T3_13 (io), W8 IO_L15N_T2_DQS_13 (io), W9 IO_L16N_T2_13 (io), W10 IO_L16P_T2_13 (io), W11 IO_L18P_T2_13 (io), Y6 IO_L13N_T2_MRCC_13 (io), Y7 IO_L13P_T2_MRCC_13 (io), Y8 IO_L14N_T2_SRCC_13 (io), Y9 IO_L14P_T2_SRCC_13 (io), Y11 IO_L18N_T2_13 (io), Y12 IO_L20P_T3_13 (io), Y13 IO_L20N_T3_13 (io)
part B pins: N17 IO_L23P_T3_34 (io), N18 IO_L13P_T2_MRCC_34 (io), N20 IO_L14P_T2_SRCC_34 (io), P14 IO_L6P_T0_34 (io), P15 IO_L24P_T3_34 (io), P16 IO_L24N_T3_34 (io), P18 IO_L23N_T3_34 (io), P19 IO_L13N_T2_MRCC_34 (io), P20 IO_L14N_T2_SRCC_34 (io), R14 IO_L6N_T0_VREF_34 (io), R16 IO_L19P_T3_34 (io), R17 IO_L19N_T3_VREF_34 (io), R18 IO_L20N_T3_34 (io), R19 IO_0_34 (io), T10 IO_L1N_T0_34 (io), T11 IO_L1P_T0_34 (io), T12 IO_L2P_T0_34 (io), T14 IO_L5P_T0_34 (io), T15 IO_L5N_T0_34 (io), T16 IO_L9P_T1_DQS_34 (io), T17 IO_L20P_T3_34 (io), T19 IO_25_34 (io), T20 IO_L15P_T2_DQS_34 (io), U12 IO_L2N_T0_34 (io), U13 IO_L3P_T0_DQS_PUDC_B_34 (io), U14 IO_L11P_T1_SRCC_34 (io), U15 IO_L11N_T1_SRCC_34 (io), U17 IO_L9N_T1_DQS_34 (io), U18 IO_L12P_T1_MRCC_34 (io), U19 IO_L12N_T1_MRCC_34 (io), U20 IO_L15N_T2_DQS_34 (io), V12 IO_L4P_T0_34 (io), V13 IO_L3N_T0_DQS_34 (io), V15 IO_L10P_T1_34 (io), V16 IO_L18P_T2_34 (io), V17 IO_L21P_T3_DQS_34 (io), V18 IO_L21N_T3_DQS_34 (io), V20 IO_L16P_T2_34 (io), W13 IO_L4N_T0_34 (io), W14 IO_L8P_T1_34 (io), W15 IO_L10N_T1_34 (io), W16 IO_L18N_T2_34 (io), W18 IO_L22P_T3_34 (io), W19 IO_L22N_T3_34 (io), W20 IO_L16N_T2_34 (io), Y14 IO_L8N_T1_34 (io), Y16 IO_L7P_T1_34 (io), Y17 IO_L7N_T1_34 (io), Y18 IO_L17P_T2_34 (io), Y19 IO_L17N_T2_34 (io)
part C pins: A20 IO_L2N_T0_AD8N_35 (io), B19 IO_L2P_T0_AD8P_35 (io), B20 IO_L1N_T0_AD0N_35 (io), C20 IO_L1P_T0_AD0P_35 (io), D18 IO_L3N_T0_DQS_AD1N_35 (io), D19 IO_L4P_T0_35 (io), D20 IO_L4N_T0_35 (io), E17 IO_L3P_T0_DQS_AD1P_35 (io), E18 IO_L5P_T0_AD9P_35 (io), E19 IO_L5N_T0_AD9N_35 (io), F16 IO_L6P_T0_35 (io), F17 IO_L6N_T0_VREF_35 (io), F19 IO_L15P_T2_DQS_AD12P_35 (io), F20 IO_L15N_T2_DQS_AD12N_35 (io), G14 IO_0_35 (io), G15 IO_L19N_T3_VREF_35 (io), G17 IO_L16P_T2_35 (io), G18 IO_L16N_T2_35 (io), G19 IO_L18P_T2_AD13P_35 (io), G20 IO_L18N_T2_AD13N_35 (io), H15 IO_L19P_T3_35 (io), H16 IO_L13P_T2_MRCC_35 (io), H17 IO_L13N_T2_MRCC_35 (io), H18 IO_L14N_T2_AD4N_SRCC_35 (io), H20 IO_L17N_T2_AD5N_35 (io), J14 IO_L20N_T3_AD6N_35 (io), J15 IO_25_35 (io), J16 IO_L24N_T3_AD15N_35 (io), J18 IO_L14P_T2_AD4P_SRCC_35 (io), J19 IO_L10N_T1_AD11N_35 (io), J20 IO_L17P_T2_AD5P_35 (io), K14 IO_L20P_T3_AD6P_35 (io), K16 IO_L24P_T3_AD15P_35 (io), K17 IO_L12P_T1_MRCC_35 (io), K18 IO_L12N_T1_MRCC_35 (io), K19 IO_L10P_T1_AD11P_35 (io), L14 IO_L22P_T3_AD7P_35 (io), L15 IO_L22N_T3_AD7N_35 (io), L16 IO_L11P_T1_SRCC_35 (io), L17 IO_L11N_T1_SRCC_35 (io), L19 IO_L9P_T1_DQS_AD3P_35 (io), L20 IO_L9N_T1_DQS_AD3N_35 (io), M14 IO_L23P_T3_35 (io), M15 IO_L23N_T3_35 (io), M17 IO_L8P_T1_AD10P_35 (io), M18 IO_L8N_T1_AD10N_35 (io), M19 IO_L7P_T1_AD2P_35 (io), M20 IO_L7N_T1_AD2N_35 (io), N15 IO_L21P_T3_DQS_AD14P_35 (io), N16 IO_L21N_T3_DQS_AD14N_35 (io)
part D pins: F6 TDO_0 (out), F9 TCK_0 (in), G6 TDI_0 (in), J6 TMS_0 (in), K9 VP_0 (in), K10 VREFN_0 (in), L6 PROGRAM_B_0 (in), L9 VREFP_0 (in), L10 VN_0 (in), M6 CFGBVS_0 (in), M9 DXP_0 (in), M10 DXN_0 (in), R10 INIT_B_0 (io), R11 DONE_0 (io)
part E pins: A5 PS_MIO6_500 (io), A6 PS_MIO5_500 (io), A7 PS_MIO1_500 (io), A9 PS_MIO43_501 (io), A10 PS_MIO37_501 (io), A11 PS_MIO36_501 (io), A12 PS_MIO34_501 (io), A14 PS_MIO32_501 (io), A15 PS_MIO26_501 (io), A16 PS_MIO24_501 (io), A17 PS_MIO20_501 (io), A19 PS_MIO16_501 (io), B5 PS_MIO9_500 (io), B7 PS_MIO4_500 (io), B8 PS_MIO2_500 (io), B9 PS_MIO51_501 (io), B10 PS_SRST_B_501 (in), B12 PS_MIO48_501 (io), B13 PS_MIO50_501 (io), B14 PS_MIO47_501 (io), B15 PS_MIO45_501 (io), B17 PS_MIO22_501 (io), B18 PS_MIO18_501 (io), C5 PS_MIO14_500 (io), C6 PS_MIO11_500 (io), C7 PS_POR_B_500 (in), C8 PS_MIO15_500 (io), C10 PS_MIO52_501 (io), C11 PS_MIO53_501 (io), C12 PS_MIO49_501 (io), C13 PS_MIO29_501 (io), C15 PS_MIO30_501 (io), C16 PS_MIO28_501 (io), C17 PS_MIO41_501 (io), C18 PS_MIO39_501 (io), D5 PS_MIO8_500 (io), D6 PS_MIO3_500 (io), D8 PS_MIO7_500 (io), D9 PS_MIO12_500 (io), D10 PS_MIO19_501 (io), D11 PS_MIO23_501 (io), D13 PS_MIO27_501 (io), D14 PS_MIO40_501 (io), D15 PS_MIO33_501 (io), D16 PS_MIO46_501 (io), E6 PS_MIO0_500 (io), E7 PS_CLK_500 (in), E8 PS_MIO13_500 (io), E9 PS_MIO10_500 (io), E11 PS_MIO_VREF_501 (in), E12 PS_MIO42_501 (io), E13 PS_MIO38_501 (io), E14 PS_MIO17_501 (io), E16 PS_MIO31_501 (io), F12 PS_MIO35_501 (io), F13 PS_MIO44_501 (io), F14 PS_MIO21_501 (io), F15 PS_MIO25_501 (io)
part F pins: A1 PS_DDR_DM0_502 (out), A2 PS_DDR_DQ2_502 (io), A4 PS_DDR_DQ3_502 (io), B2 PS_DDR_DQS_N0_502 (io), B3 PS_DDR_DQ1_502 (io), B4 PS_DDR_DRST_B_502 (out), C1 PS_DDR_DQ6_502 (io), C2 PS_DDR_DQS_P0_502 (io), C3 PS_DDR_DQ0_502 (io), D1 PS_DDR_DQ5_502 (io), D3 PS_DDR_DQ4_502 (io), D4 PS_DDR_A13_502 (out), E1 PS_DDR_DQ7_502 (io), E2 PS_DDR_DQ8_502 (io), E3 PS_DDR_DQ9_502 (io), E4 PS_DDR_A12_502 (out), F1 PS_DDR_DM1_502 (out), F2 PS_DDR_DQS_N1_502 (io), F4 PS_DDR_A14_502 (out), F5 PS_DDR_A10_502 (out), G2 PS_DDR_DQS_P1_502 (io), G3 PS_DDR_DQ10_502 (io), G4 PS_DDR_A11_502 (out), G5 PS_DDR_VRN_502 (out), H1 PS_DDR_DQ14_502 (io), H2 PS_DDR_DQ13_502 (io), H3 PS_DDR_DQ11_502 (io), H5 PS_DDR_VRP_502 (out), H6 PS_DDR_VREF0_502 (in), J1 PS_DDR_DQ15_502 (io), J3 PS_DDR_DQ12_502 (io), J4 PS_DDR_A9_502 (out), J5 PS_DDR_BA2_502 (out), K1 PS_DDR_A8_502 (out), K2 PS_DDR_A1_502 (out), K3 PS_DDR_A3_502 (out), K4 PS_DDR_A7_502 (out), L1 PS_DDR_A5_502 (out), L2 PS_DDR_CKP_502 (out), L4 PS_DDR_A6_502 (out), L5 PS_DDR_BA0_502 (out), M2 PS_DDR_CKN_502 (out), M3 PS_DDR_A2_502 (out), M4 PS_DDR_A4_502 (out), M5 PS_DDR_WE_B_502 (out), N1 PS_DDR_CS_B_502 (out), N2 PS_DDR_A0_502 (out), N3 PS_DDR_CKE_502 (out), N5 PS_DDR_ODT_502 (out), P1 PS_DDR_DQ16_502 (io), P3 PS_DDR_DQ17_502 (io), P4 PS_DDR_RAS_B_502 (out), P5 PS_DDR_CAS_B_502 (out), P6 PS_DDR_VREF1_502 (in), R1 PS_DDR_DQ19_502 (io), R2 PS_DDR_DQS_P2_502 (io), R3 PS_DDR_DQ18_502 (io), R4 PS_DDR_BA1_502 (out), T1 PS_DDR_DM2_502 (out), T2 PS_DDR_DQS_N2_502 (io), T4 PS_DDR_DQ20_502 (io), U2 PS_DDR_DQ22_502 (io), U3 PS_DDR_DQ23_502 (io), U4 PS_DDR_DQ21_502 (io), V1 PS_DDR_DQ24_502 (io), V2 PS_DDR_DQ30_502 (io), V3 PS_DDR_DQ31_502 (io), W1 PS_DDR_DQ26_502 (io), W3 PS_DDR_DQ29_502 (io), W4 PS_DDR_DQS_N3_502 (io), W5 PS_DDR_DQS_P3_502 (io), Y1 PS_DDR_DM3_502 (out), Y2 PS_DDR_DQ28_502 (io), Y3 PS_DDR_DQ25_502 (io), Y4 PS_DDR_DQ27_502 (io)
part G pins: C19 VCCO_35 (power), F18 VCCO_35 (power), H14 VCCO_35 (power), J17 VCCO_35 (power), K6 VCCO_0 (power), K20 VCCO_35 (power), M16 VCCO_35 (power), N6 RSVDVCC3 (power), N19 VCCO_34 (power), R6 RSVDVCC2 (power), R15 VCCO_34 (power), T6 RSVDVCC1 (power), T8 VCCO_13 (power), T18 VCCO_34 (power), U11 VCCO_13 (power), V14 VCCO_34 (power), W7 VCCO_13 (power), W17 VCCO_34 (power), Y10 VCCO_13 (power), Y20 VCCO_34 (power)
part H pins: A3 VCCO_DDR_502 (power), A13 VCCO_MIO1_501 (power), B6 VCCO_MIO0_500 (power), B16 VCCO_MIO1_501 (power), D2 VCCO_DDR_502 (power), D7 VCCO_MIO0_500 (power), D12 VCCO_MIO1_501 (power), E5 VCCO_DDR_502 (power), E15 VCCO_MIO1_501 (power), F8 VCCPAUX (power), F11 VCCBATT_0 (power), G1 VCCO_DDR_502 (power), G7 VCCPINT (power), G8 VCCPLL (power), G9 VCCPAUX (power), G11 VCCBRAM (power), G13 VCCINT (power), H4 VCCO_DDR_502 (power), H8 VCCPAUX (power), H10 VCCBRAM (power), H12 VCCINT (power), J7 VCCPINT (power), J9 VCCADC_0 (power), J11 VCCAUX (power), J13 VCCINT (power), K8 VCCPAUX (power), K12 VCCINT (power), L3 VCCO_DDR_502 (power), L7 VCCPINT (power), L11 VCCAUX (power), L13 VCCINT (power), M8 VCCPAUX (power), M12 VCCINT (power), N7 VCCPINT (power), N9 VCCAUX (power), N11 VCCAUX (power), N13 VCCINT (power), P2 VCCO_DDR_502 (power), P8 VCCPINT (power), P10 VCCAUX (power), P12 VCCINT (power), R5 VCCO_DDR_502 (power), R7 VCCPINT (power), R9 VCCAUX (power), R13 VCCINT (power), U1 VCCO_DDR_502 (power), V4 VCCO_DDR_502 (power)
part I pins: A8 GND (power), A18 GND (power), B1 GND (power), B11 GND (power), C4 GND (power), C9 GND (power), C14 GND (power), D17 GND (power), E10 GND (power), E20 GND (power), F3 GND (power), F7 GND (power), F10 RSVDGND (power), G10 GND (power), G12 GND (power), G16 GND (power), H7 GND (power), H9 GND (power), H11 GND (power), H13 GND (power), H19 GND (power), J2 GND (power), J8 GND (power), J10 GNDADC_0 (power), J12 GND (power), K5 GND (power), K7 GND (power), K11 GND (power), K13 GND (power), K15 GND (power), L8 GND (power), L12 GND (power), L18 GND (power), M1 GND (power), M7 GND (power), M11 GND (power), M13 GND (power), N4 GND (power), N8 GND (power), N10 GND (power), N12 GND (power), N14 GND (power), P7 GND (power), P9 GND (power), P11 GND (power), P13 GND (power), P17 GND (power), R8 GND (power), R12 GND (power), R20 GND (power), T3 GND (power), T7 GND (power), T13 GND (power), U6 GND (power), U16 GND (power), V9 GND (power), V19 GND (power), W2 GND (power), W12 GND (power), Y5 GND (power), Y15 GND (power)
part A text: BANK 13
part B text: BANK 34
part C text: BANK 35

## CMP-0395-00664-2
designator U?, comment TPS51200DRCR
Single Output LDO, 3 A, 2.375 to 3.5 V Input, with DDR Termination, 10-pin SON (DRC), -40 to 85 degC, Green (RoHS & no Sb/Br); Manufacturer: Texas Instruments; Vin(Min)(V): 2.3; Vin(Max)(V): 3.5; SubFamily: Single Channel LDO; Iout(Max)(A): 3; Power Good: TRUE; Iq(Typ)(mA): 0.5; Rating: Catalog; ComponentLink1URL: http://www.ti.com/; ComponentLink3URL: http://www.ti.com/litv/pdf/mpds117k; PackageVersion: 4204102-3/L; Mounting Technology: Surface Mount; DatasheetVersion: SLUS812; Eco-Plan: Green (RoHS & no Sb/Br); ComponentLink4URL: Samples URL:http://www.ti.com/product/tps51200#samples; ComponentLink3Description: Package Specification; PackageReference: DRC0010J; ComponentLink2URL: http://www.ti.com/general/docs/lit/getliterature.tsp?genericPartNumber=TPS51200&fileType=pdf; ComponentLink2Description: Datasheet; PartNumber: TPS51200DRCR; PackageDescription: 10-Pin Plastic Small Outline, Body 3 x 3 mm, Pitch 0.5 mm; ComponentLink4Description: URL Link1; ComponentLink1Description: Manufacturer URL; Manufacturer Part Number: TPS51200DRCR
footprint DRC0010J_V (SON, 10-Leads, Body 3x3mm, Pitch 0.5mm, Thermal Pad 2.4x1.65mm, TI Recommended)
pins: 1 REFIN (in) "Reference input", 2 VLDOIN (power) "Supply voltage for the LDO", 3 VO (power) "Power output for the LDO", 4 PGND (power) "Power ground output for the LDO", 5 VOSNS (in) "Voltage sense output for the LDO. Connect to positive terminal of the output capacitor or the load.", 6 REFOUT (power) "Reference output. Connect to GND through 0.1-uF ceramic capacitor.", 7 EN (in) "For DDR VTT application, connect EN to SLP_S3. For any other application(s), use EN as the ON/OFF function.", 8 GND (power) "Ground.Signal ground. Connect to negative terminal of the output capacitor.", 9 PGOOD (oc) "PGOOD output. Indicates regulation.", 10 VIN (power) "2.5-V or 3.3-V power supply A ceramic decoupling capacitor with a value between 1-uF and 4.7-uF is required.", 11 EP (power) "Exposed thermal pad"

## CMP-0479-00067-2
designator U?, comment LTC4353IDE#PBF
IC OR CTRLR LOAD SHARE 16DFN; Manufacturer: Analog Devices; Turn-On Delay Time: 400ns; Turn-Off Delay Time: 1us; Number of Drivers: 2; Propagation Delay: 1000ns; Max Supply Voltage: 18V; Min Supply Voltage: 3V; Number of Pins: 16; Case/Package: DFN EP; Package Quantity: 91; REACH SVHC: No SVHC; RoHS Compliant: Yes; Lead Free: Lead Free; Max Operating Temperature: 85°C; Min Operating Temperature: -40°C; Series: -; Number of Outputs: 2; Manufacturer Part Number: LTC4353IDE#PBF
footprint FP-DE-16-05-08-1732-IPC_C
footprint FP-DE-16-05-08-1732-MFG
footprint FP-DE-16-05-08-1732-IPC_A
footprint FP-DE-16-05-08-1732-IPC_B
pins: 1 ~{EN2} (in), 2 NC, 3 NC, 4 VIN2 (power), 5 GATE2, 6 CPO2 (out), 7 OUT2, 8 ~{ONST2} (out), 9 ~{ONST1} (out), 10 OUT1, 11 CPO1 (out), 12 GATE1, 13 VIN1 (power), 14 VCC (power), 15 GND (power), 16 ~{EN1} (in), 17 EP

## CMP-2000-07475-2
designator U?, comment MT41K256M16TW-107:P
IC DRAM 4G PARALLEL 96FBGA; Manufacturer: Micron; Access Time: 1.07ns; Nominal Supply Current: 12-156mA; Min Supply Voltage: 1.283V; Memory Type: SDRAM,DDR3; Standoff Height: 0.29mm; Max Supply Voltage: 1.45V; Memory Size: 4Gbits; Device Class L1: Integrated Circuits (ICs); Lead Free: Yes; ComponentLink2Description: Datasheet; Manufacturer Part Number: MT41K256M16TW-107:P; Category: IC; Digikey Description: IC DRAM 4G PARALLEL 96FBGA; Device Class L3: RAM; Interface: Parallel; RoHS: TRUE; Octopart: https://octopart.com/mt41k256m16tw-107%3Ap-micron-66533852; Temperature Range High: +85°C; ComponentLink2URL: https://www.micron.com/-/media/client/global/documents/products/data-sheet/dram/ddr3/4gb_ddr3l.pdf; Temperature: 0°C to +85°C; Package: TW; Device Class L2: Memory; Automotive: No; Height: 1.2mm; Temperature Range Low: 0°C
footprint FP-TW-IPC_C
footprint FP-TW-IPC_B
footprint FP-TW-IPC_A
part A pins: A2 DQ13 (io), A3 DQ15 (io), A7 DQ12 (io), B7 ~{UDQS} (io), B8 DQ14, C2 DQ11 (io), C3 DQ9 (io), C7 UDQS (io), C8 DQ10 (io), D3 UDM (in), D7 DQ8 (io), E3 DQ0 (io), E7 LDM (in), F2 DQ2 (io), F3 LDQS (io), F7 DQ1 (io), F8 DQ3 (io), G2 DQ6 (io), G3 ~{LDQS} (io), H3 DQ4 (io), H7 DQ7 (io), H8 DQ5 (io), J1 NC, J3 ~{RAS} (in), J7 CK (in), J9 NC, K1 ODT (in), K3 ~{CAS} (in), K7 ~{CK} (in), K9 CKE (in), L1 NC, L2 ~{CS} (in), L3 ~{WE} (in), L7 A10/AP (in), L8 ZQ, L9 NC, M2 BA0 (in), M3 BA2 (in), M7 NC, N2 A3 (in), N3 A0 (in), N7 A12/~{BC} (in), N8 BA1 (in), P2 A5 (in), P3 A2 (in), P7 A1 (in), P8 A4 (in), R2 A7 (in), R3 A9 (in), R7 A11 (in), R8 A6 (in), T2 ~{RESET} (in), T3 A13 (in), T7 A14 (in), T8 A8 (in)
part B pins: A1 VDDQ (power), A8 VDDQ (power), A9 VSS (power), B1 VSSQ (power), B2 VDD (power), B3 VSS (power), B9 VSSQ (power), C1 VDDQ (power), C9 VDDQ (power), D1 VSSQ (power), D2 VDDQ (power), D8 VSSQ (power), D9 VDD (power), E1 VSS (power), E2 VSSQ (power), E8 VSSQ (power), E9 VDDQ (power), F1 VDDQ (power), F9 VSSQ (power), G1 VSSQ (power), G7 VDD (power), G8 VSS (power), G9 VSSQ (power), H1 VREFDQ (power), H2 VDDQ (power), H9 VDDQ (power), J2 VSS (power), J8 VSS (power), K2 VDD (power), K8 VDD (power), M1 VSS (power), M8 VREFCA (power), M9 VSS (power), N1 VDD (power), N9 VDD (power), P1 VSS (power), P9 VSS (power), R1 VDD (power), R9 VDD (power), T1 VSS (power), T9 VSS (power)

## CMP-2000-07569-1
designator U?, comment TPS82130SILT
Step-Down Converter MicroSiP(TM) Module with Integrated Inductor, 3 A, 3 to 17 V, -40 to 125 degC, 8-Pin uSiP (SIL), Tape and Reel; Manufacturer: Texas Instruments; Quiescent Current: 20uA; Output Voltage: 5V; Output Current: 3A; Max Input Voltage: 17V; Switching Frequency: 2MHz; Min Output Voltage: 900mV; Number of Outputs: 1; Min Input Voltage: 3V; Datasheet URL: http://www.ti.com/lit/ds/symlink/tps82130.pdf; Packaging: CutTape; Datasheet Version: Rev. C, 01/2017; Package Reference: SIL0008D; Case/Package: SMD/SMT; Manufacturer URL: http://www.ti.com/; Length: 0.12inch; Lead Free: LeadFree; Mount: SurfaceMount; Number of Pins: 8; Package Description: 8-Pin Single In-line Package, Body 3 x 2.8 mm, Pitch 0.65 mm; Max Output Voltage: 5V; Mounting Technology: SurfaceMount; Height: 0.06inch; Max Operating Temperature: 125degC; Width: 0.11inch; Min Operating Temperature: -40degC; Voltage - Output 1: 5V; RoHSCompliant: True; REACH SVHC: NoSVHC; Max Output Current: 3A; Manufacturer Part Number: TPS82130SILT
footprint SIL0008D_V (PSON, 8-Leads, Body 3.00x2.80mm, Pitch 0.65mm, Thermal Pad 1.90x1.1mm)
pins: 1 EN (in) "Enable pin. Pull High to enable the device. Pull Low to disable the device. This pin has an internal pull-down resistor of typically 400kohm when the device is disabled", 2 VIN "Input pin.", 3 GND (power) "Ground pin.", 4 VOUT (power) "Output pin.", 5 VOUT (power) "Output pin.", 6 FB (in) "Feedback reference pin. An external resistor divider connected to this pin programs the output voltage.", 7 PG (oc) "Power good open drain output pin. A pull-up resistor can be connected to any voltage less than 6V. Leave it open if it is not used.", 8 SS/TR (in), 9 EP (power) "The exposed thermal pad must be connected to the GND pin. Must be soldered to achieve appropriate power dissipation and mechanical reliability."

## CMP-03913-103227005-2
designator J?, comment 10M_EXT
Rf Coaxial, Mmcx Jack, 50 Ohm, Pcb Rohs Compliant: Yes; Manufacturer: Wurth Elektronik; Manufacturer Part Number: 66012202111305; Impedance: 50Ω; Insertion Loss (dB): 0.25dB; Insulation Resistance: 1GΩ; Insulation Material: PTFE; Min Operating Temperature: -55°C; Packaging: Tape and Reel; Connector Type: MMCX; Max Operating Temperature: 155°C
footprint 66012202111305 (Rf Coaxial, Mmcx Jack, 50 Ohm, Pcb Rohs Compliant: Yes)
pins: 1 Signal "Signal Pin", 2 GND, 3 GND

## CMP-04877-000019-1
designator U?, comment HD3SS3220IRNHT
USB TYPE-C DRP PORT CONTROLLER W; Manufacturer: Texas Instruments; Max Supply Voltage: 5.5V; Min Supply Voltage: 3V; Number of Ports: 1; Data Rate: 10Gbps; USB Standard: USB 3.1; Mount: Surface Mount; Max Operating Temperature: 70°C; Lead Free: Lead Free; RoHS Compliant: Yes; Packaging: Tape and Reel; Number of Pins: 30; Min Operating Temperature: 0°C; REACH SVHC: No SVHC; Manufacturer Part Number: HD3SS3220IRNHT
footprint FP-RNH0030A-MFG
footprint FP-RNH0030A-IPC_C
footprint FP-RNH0030A-IPC_B
footprint FP-RNH0030A-IPC_A
pins: 1 CC2 (io), 2 CC1 (io), 3 CURRENT MODE (in), 4 PORT (in), 5 VBUS DET (power), 6 TXp (io), 7 TXn (io), 8 VCC33 (power), 9 RXp (io), 10 RXn (io), 11 DIR (out), 12 ~{EN} MUX (in), 13 GND (power), 14 RX1n (io), 15 RX1p (io), 16 TX1n (io), 17 TX1p (io), 18 RX2n (io), 19 RX2p (io), 20 TX2n (io), 21 TX2p (io), 22 ADDR (in), 23 ~{INT}/OUT3 (oc), 24 VCONN ~{FAULT} (oc), 25 SDA/OUT1 (io), 26 SCL/OUT2 (io), 27 ID (oc), 28 GND (power), 29 ~{EN CC} (in), 30 VDD5 (power), 31 Thermal Pad (power)

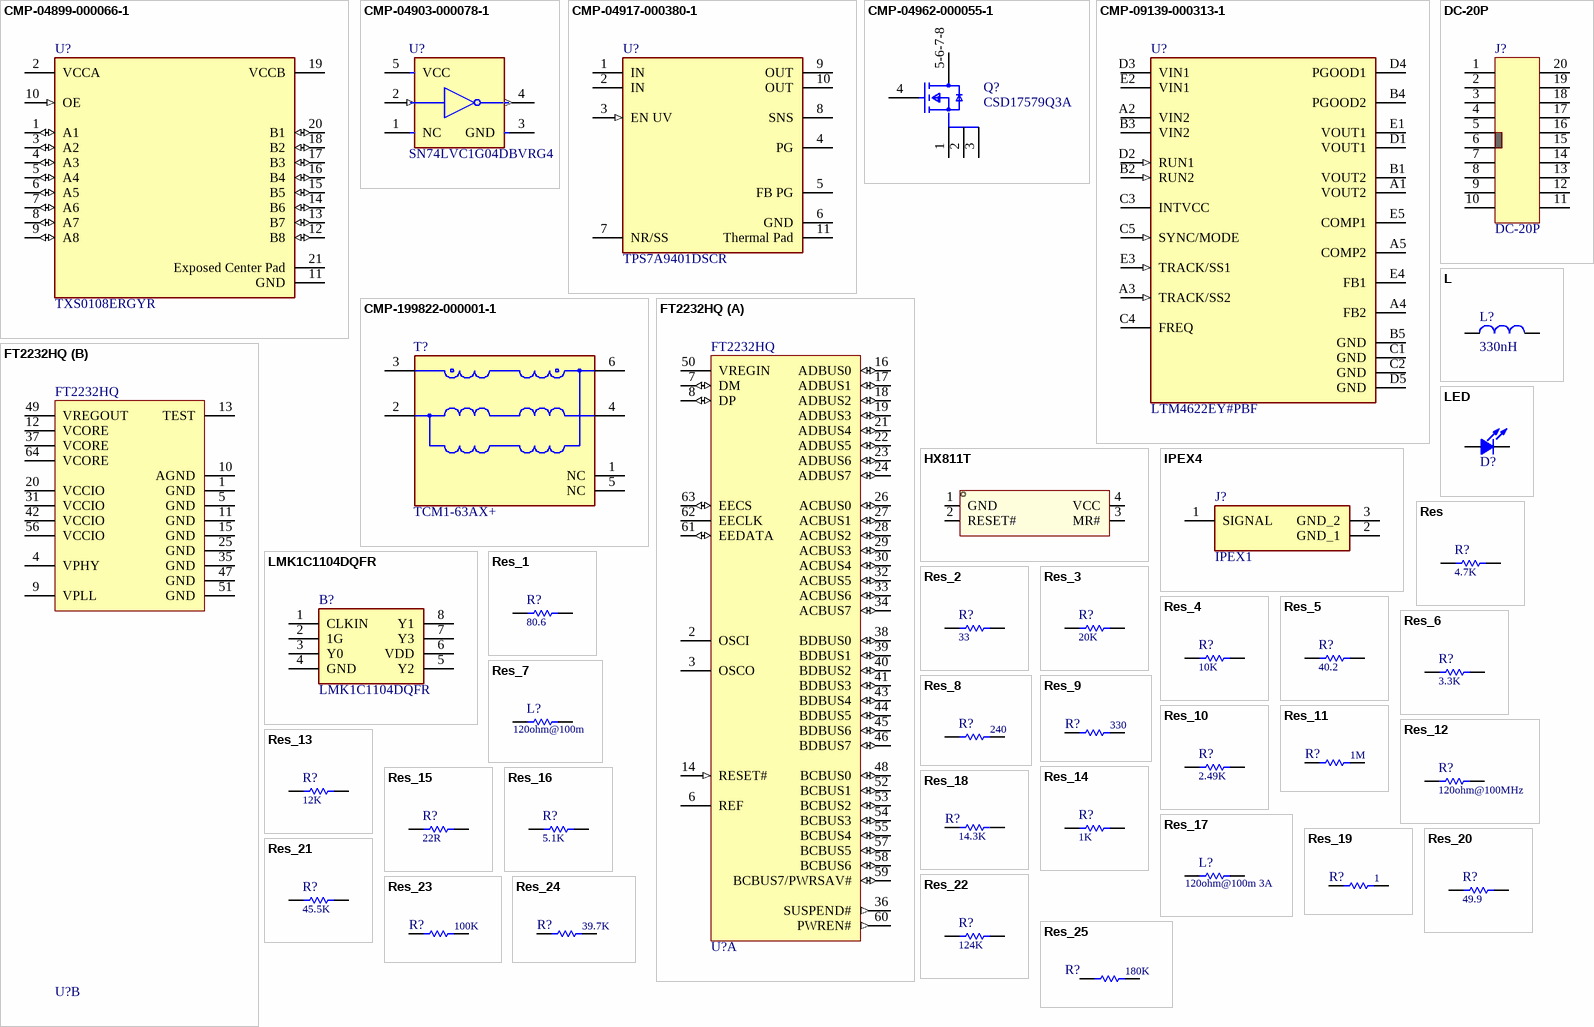
[diagram p3: symbols CMP-04899-000066-1 to Res_25]

## CMP-04899-000066-1
designator U?, comment TXS0108ERGYR
IC TRNSLTR BIDIRECTIONAL 20VQFN; Manufacturer: Texas Instruments; Propagation Delay: 4.8ns; Number of Channels: 8; High Level Output Current: -50mA; Min Supply Voltage: 1.2V; Data Rate: 60Mbps; Quiescent Current: 3uA; Logic Function: Translator; Low Level Output Current: 50mA; Max Supply Voltage: 5.5V; Output Type: Voltage; Turn-On Delay Time: 312ns; Packaging: Tape and Reel; Min Operating Temperature: -40°C; Package Quantity: 1; Case/Package: VQFN; Mount: Surface Mount; Number of Pins: 20; Radiation Hardening: No; Series: -; RoHS Compliant: Yes; REACH SVHC: No SVHC; Max Operating Temperature: 85°C; Number of Bits: 8; Lead Free: Lead Free; Weight: 0.001517oz; Number of Inputs: 8; Manufacturer Part Number: TXS0108ERGYR
footprint FP-RGY0020A-MFG
pins: 1 A1 (io), 2 VCCA (power), 3 A2 (io), 4 A3 (io), 5 A4 (io), 6 A5 (io), 7 A6 (io), 8 A7 (io), 9 A8 (io), 10 OE (in), 11 GND (power), 12 B8 (io), 13 B7 (io), 14 B6 (io), 15 B5 (io), 16 B4 (io), 17 B3 (io), 18 B2 (io), 19 VCCB (power), 20 B1 (io), 21 Exposed Center Pad (power)

## CMP-04903-000078-1
designator U?, comment SN74LVC1G04DBVRG4
IC INVERTER 1CH 1-INP SOT23-5; Manufacturer: Texas Instruments; Logic Function: Buffer; Number of Bits: 1; Voltage Rating (AC): 250V; Min Supply Voltage: 1.65V; Capacitance: 22nF; Propagation Delay: 3.7ns; Tolerance: 5%; High Level Output Current: -32mA; Turn-On Delay Time: 7.5ns; Voltage Rating (DC): 400V; Output Current: 32mA; Dielectric Material: PP; Quiescent Current: 10uA; Max Supply Voltage: 5.5V; REACH SVHC: No SVHC; Case/Package: SOT-23-5; Number of Pins: 5; Min Operating Temperature: -40°C; Technology: CMOS; Number of Inputs: 1; Weight: 0.000557oz; Radiation Hardening: No; Packaging: Tape and Reel; RoHS Compliant: Yes; Package Quantity: 3000; Number of Gates: 1; Lead Free: Lead Free; Termination: PC Pins; Mount: Surface Mount; Series: 74LVC; Number of Elements: 1; Number of Circuits: 1; Max Operating Temperature: 125°C; Low Level Output Current: 32mA; Manufacturer Part Number: SN74LVC1G04DBVRG4
footprint FP-DBV0005A-IPC_C
footprint FP-DBV0005A-MFG
footprint FP-DBV0005A-IPC_A
footprint FP-DBV0005A-IPC_B
pins: 1 NC, 2 A (in), 3 GND (power), 4 Y (out), 5 VCC (power)

## CMP-04917-000380-1
designator U?, comment TPS7A9401DSCR
1-A, ULTRA-LOW NOISE, ULTRA-HIGH; Manufacturer: Texas Instruments; Manufacturer Part Number: TPS7A9401DSCR
footprint FP-DSC0010J-MFG
pins: 1 IN (power), 2 IN (power), 3 EN UV (in), 4 PG (oc), 5 FB PG, 6 GND (power), 7 NR/SS, 8 SNS, 9 OUT (power), 10 OUT (power), 11 Thermal Pad (power)

## CMP-04962-000055-1
designator Q?, comment CSD17579Q3A
MOSFET N-CH 30V 35A 8VSON; Manufacturer: Texas Instruments; Rise Time: 5ns; Fall Time: 1ns; Max Power Dissipation: 3.2W; Turn-On Delay Time: 2ns; Rds On Max: 10.2mR; Turn-Off Delay Time: 11ns; Gate to Source Voltage (Vgs): 20V; Continuous Drain Current (ID): 20A; Element Configuration: Single; Input Capacitance: 998pF; Packaging: Tape and Reel; Lead Free: Lead Free; Min Operating Temperature: -55°C; Number of Pins: 8; Contact Plating: Copper; Mount: Surface Mount; RoHS Compliant: Yes; Drain to Source Voltage (Vdss): 30V; Max Operating Temperature: 150°C; Manufacturer Part Number: CSD17579Q3A
footprint FP-DNH0008A-MFG
pins: 1 S, 2 S, 3 S, 4 G, 5-6-7-8 D

## CMP-09139-000313-1
designator U?, comment LTM4622EY#PBF
DC DC CNVRTR 0.6-5.5V 0.6-5.5V; Manufacturer: Analog Devices; Max Output Current: 2.5A; Output Current: 5A; Min Output Voltage: 600mV; Max Input Voltage: 20V; Min Input Voltage: 3.6V; Switching Frequency: 1MHz; Number of Outputs: 2; Max Output Voltage: 5.5V; REACH SVHC: No SVHC; Mount: Surface Mount; Number of Pins: 25; Case/Package: BGA; Packaging: Tray; RoHS Compliant: Yes; Min Operating Temperature: -40°C; Height: 0.07inch; Features: OVP; Length: 0.25inch; Max Operating Temperature: 125°C; Voltage - Output 1: 5.5V; Width: 0.25inch; Manufacturer Part Number: LTM4622EY#PBF
footprint FP-BGA-25-05-08-1502-MFG
footprint FP-BGA-25-05-08-1502-IPC_C
footprint FP-BGA-25-05-08-1502-IPC_A
footprint FP-BGA-25-05-08-1502-IPC_B
pins: A1 VOUT2 (power), A2 VIN2, A3 TRACK/SS2 (in), A4 FB2, A5 COMP2, B1 VOUT2 (power), B2 RUN2 (in), B3 VIN2, B4 PGOOD2 (oc), B5 GND (power), C1 GND (power), C2 GND (power), C3 INTVCC, C4 FREQ, C5 SYNC/MODE (in), D1 VOUT1 (power), D2 RUN1 (in), D3 VIN1, D4 PGOOD1 (oc), D5 GND (power), E1 VOUT1 (power), E2 VIN1, E3 TRACK/SS1 (in), E4 FB1, E5 COMP1